# Altium schematic symbol library 4_7µFX7R.SchLib: 1 symbol
Pins are listed as number, name and electrical type; pins without a type are passive.

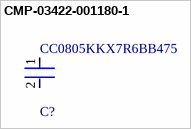
[diagram p0: symbol CMP-03422-001180-1]

## CMP-03422-001180-1
designator C?, comment CC0805KKX7R6BB475
CAP CER 4.7UF 10V X7R 0805; Manufacturer: Yageo; Tolerance: 0.1; Material: Ceramic; ComponentLink2Description: Datasheet; ComponentLink2URL: http://www.yageo.com/documents/recent/UPY-GPHC_Y5V_6.3V-to-50V_8.pdf; Capacitance: 4.7 uF; Mouser Description: 0805 4.7 uF 10 V ±10% Tolerance X7R SMT Multilayer Ceramic Capacitor; Automotive: No; Value: 4.7 uF; Height: 0.95mm; Temperature: -30°C to +85°C; Temperature Range High: +85°C; Octopart: https://octopart.com/cc0805kkx7r6bb475-yageo-11543698; Footprint Url: http://www.yageo.com/exep/pages/download/literatures/UPY-C_GEN_24.pdf; Voltage Rating: 10 V; Temperature Range Low: -30°C; Lead Free: Yes; Device Class L3: Ceramic Capacitors; Digikey Description: CAP CER 4.7UF 10V X7R 0805; Temperature Characteristic: X7R; Category: Cap; Package: CC0805-0.85; Manufacturer Part Number: CC0805KKX7R6BB475; Device Class L1: Passive Components; Ipc Land Pattern Name: CAPC200125X85; RoHS: TRUE; Device Class L2: Capacitors
footprint FP-CC0805-0_85-IPC_C
footprint FP-CC0805-0_85-IPC_A
footprint FP-CC0805-0_85-MFG
footprint FP-CC0805-0_85-IPC_B
pins: 1, 2